# Altium schematic symbol library Centralize.SchLib: 1081 symbols (part 6 of 26)
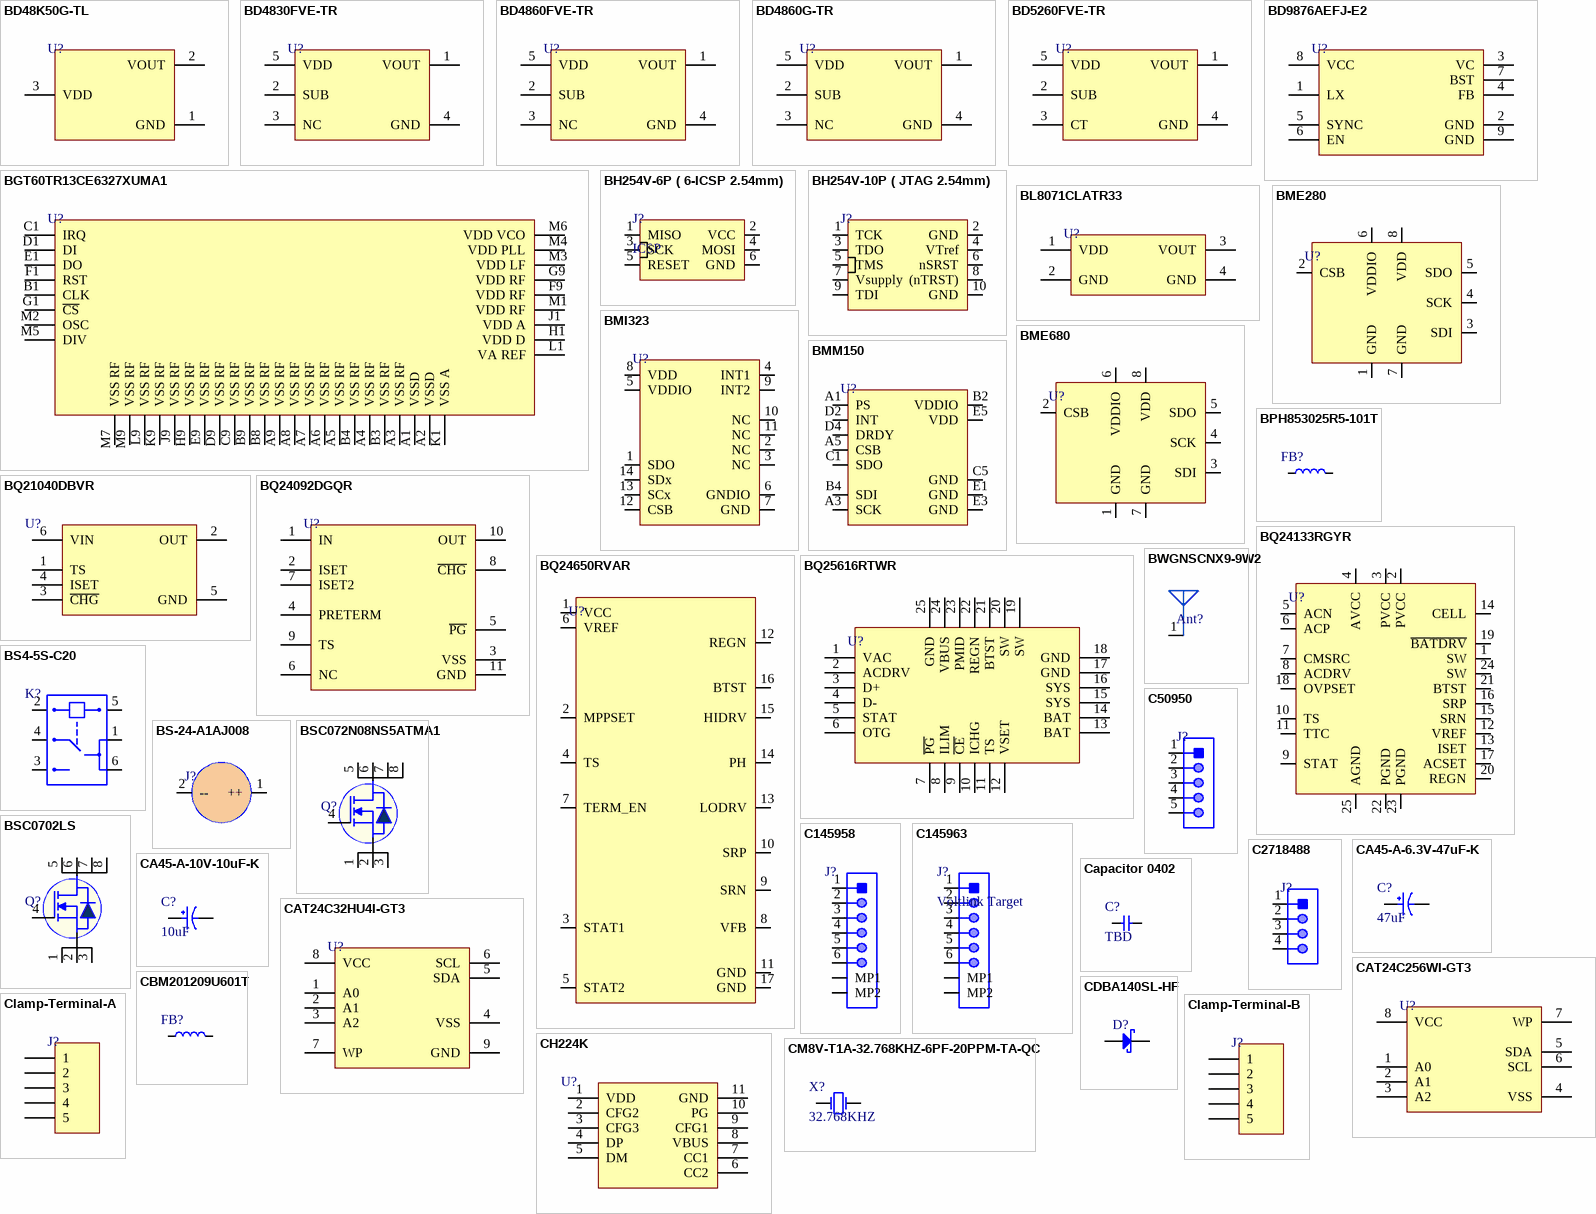
[diagram p52: symbols BD48K50G-TL to CM8V-T1A-32.768KHZ-6PF-20PPM-TA-QC]

## BSC0702LS
designator Q?
MOSFET N-CH 60V 100A SUPERSO8; Manufacturer: Infineon; Manufacturer Part Number: BSC0702LSATMA1; Item Type: Transistor; Supplier 1: Digi-Key; RoHS: No; Category: MOSFETs; Stock 1: 9380; Pricing 1: 1=1.88000, 10=1.69000, 100=1.35800, 500=1.11572, 1000=0.92978 (USD); LCSC Part Number: C501503; Supplier Part Number 1: 448-BSC0702LSATMA1CT-ND; ComponentLink1Description: LCSC; ComponentLink1URL: https://www.lcsc.com/product-detail/MOSFETs_Infineon-Technologies-BSC0702LS_C501503.html
footprint PG-TDSON-8
pins: 1 S, 2 S, 3 S, 4 G, 5 D, 6 D, 7 D, 8 D

## BWGNSCNX9-9W2
designator Ant?
Plugin,9x9mm Antennas ROHS; Manufacturer: BAT WIRELESS; Manufacturer Part Number: BWGNSCNX9-9W2; Package: Plugin,9x9mm; LCSC Part Number: C2826452; Item Type: Antenna; ComponentLink1Description: LCSC; ComponentLink1URL: https://www.lcsc.com/product-detail/Antennas_BAT-WIRELESS-BWGNSCNX9-9W2_C2826452.html
pins: 1 Feed

## C50950
designator J?
2.54mm Plugin Straight 1x5P 5 Plugin,P=2.54mm Female Headers ROHS; Manufacturer: BOOMELE; Manufacturer Part Number: C50950; Package: Plugin,P=2.54mm; LCSC Part Number: C50950; Item Type: Female Header; ComponentLink1Description: LCSC; ComponentLink1URL: https://www.lcsc.com/product-detail/Female-Headers_BOOMELE-Boom-Precision-Elec-C50950_C50950.html
footprint HDR 1x5 Female
pins: 1, 2, 3, 4, 5

## C145958
designator J?
1x6P SH 1 1mm 6 Phosphor coppe SMD,P=1mm Wire To Board / Wire To Wire Connector ROHS; Manufacturer Part Number: C145958; Manufacturer: BOOMELE; Package: SMD,P=1mm; LCSC Part Number: C145958; ComponentLink1Description: LCSC; ComponentLink1URL: https://www.lcsc.com/product-detail/Wire-To-Board-Wire-To-Wire-span-style-background-color-ff0-Connector-span_BOOMELE-Boom-Precision-Elec-C145958_C145958.html; Item Type: Connector
footprint Voltlink Horizontal
pins: 1, 2, 3, 4, 5, 6, MP1, MP2

## C145963
designator J?, comment Voltlink Target
1x6P SH 1 1mm 6 SMD,P=1mm Wire To Board / Wire To Wire Connector ROHS; Manufacturer: BOOMELE; Manufacturer Part Number: C145963; Package: SMD,P=1mm; LCSC Part Number: C145963; Item Type: Connector; ComponentLink1Description: LCSC; ComponentLink1URL: https://www.lcsc.com/product-detail/Wire-To-Board-Wire-To-Wire-Connector_BOOMELE-Boom-Precision-Elec-C145963_C145963.html
footprint Voltlink Target
pins: 1, 2, 3, 4, 5, 6, MP1, MP2

## C2718488
designator J?
2.54mm Plugin 3A bronze -40℃~+105℃ Straight 1x4P Top 4 Square Holes Plugin,P=2.54mm Female Headers ROHS; Manufacturer: BOOMELE; Manufacturer Part Number: C2718488; Item Type: Header; Package: Plugin,P=2.54mm; LCSC Part Number: C2718488; ComponentLink1Description: LCSC; ComponentLink1URL: https://www.lcsc.com/product-detail/Female-Headers_BOOMELE-Boom-Precision-Elec-C2718488_C2718488.html
footprint HDR1X4 Female
pins: 1, 2, 3, 4

## CA45-A-6.3V-47uF-K
designator C?, comment 47uF
47uF 6.3V 5Ω@100kHz ±10% CASE-A-3216 Tantalum Capacitors ROHS; Manufacturer: CEC; Manufacturer Part Number: CA45-A-6.3V-47uF-K; Package: CASE-A-3216; ComponentLink1Description: LCSC; ComponentLink1URL: https://www.lcsc.com/product-detail/Tantalum-Capacitors_CEC-Shenzhen-Zhenhua-XinYun-Elec-CA45-A-6-3V-47uF-K_C129570.html; LCSC Part Number: C129570; Item Type: Capacitor
footprint Case-A
pins: 1, 2

## CA45-A-10V-10uF-K
designator C?, comment 10uF
10uF 10V 8Ω@100kHz ±10% CASE-A-3216 Tantalum Capacitors ROHS; Manufacturer: CEC(Shenzhen Zhenhua XinYun Elec); Manufacturer Part Number: CA45-A-10V-10uF-K; Package: CASE-A-3216; LCSC Part Number: C128253; Item Type: Capacitor; ComponentLink1Description: LCSC; ComponentLink1URL: https://www.lcsc.com/product-detail/Tantalum-Capacitors_CEC-Shenzhen-Zhenhua-XinYun-Elec-CA45-A-10V-10uF-K_C128253.html
footprint Case-A
pins: 1, 2

## Capacitor 0402
designator C?, comment TBD
DO Not Mount
footprint Cap-0402
pins: 1, 2

## CAT24C32HU4I-GT3
designator U?
IC EEPROM 32KBIT I2C 1MHZ 8UDFN; Manufacturer: ON Semiconductor; Manufacturer Part Number: CAT24C32HU4I-GT3; Interface: I2C,Serial,2-Wire; Density: 32Kb; Max Supply Voltage: 5.5V; Min Supply Voltage: 1.7V; Number of Words: 4096; Access Time: 3500ns; Frequency: 100kHz; Nominal Supply Current: 2mA; Operating Supply Voltage: 5V; Organization: 4KX8; Access Time-Max: 900ns; Write Protection: YES; Supplier 1: Digi-Key; RoHS: Yes; Category: EEPROM; Stock 1: 5701; Pricing 1: 1=0.47000, 10=0.45700, 25=0.42440, 50=0.42220, 100=0.37490, 250=0.37012, 500=0.36452, 1000=0.35478 (USD); Mount: Surface Mount; Number of Pins: 8; Contact Plating: Gold; Min Operating Temperature: -40°C; Max Operating Temperature: 85°C; Packaging: Tape and Reel; Package Quantity: 3000; Memory Type: EEPROM; Memory Size: 32Kb; Max Frequency: 1MHz; Series: -; Supply Current: 2mA; Length: 3.05mm; Width: 2.05mm; Height: 0.5mm; Radiation Hardening: No; REACH SVHC: No SVHC; Lead Free: Lead Free; Halogen Free: Halogen Free; RoHS Compliant: Yes; ComponentLink1URL: https://datasheet.ciiva.com/15123/getdatasheetpartid-488928-15123672.pdf?src-supplier=Verical; ComponentLink1Description: https://datasheet.ciiva.com/15123/getdatasheetpartid-488928-15123672.pdf?src-supplier=Verical; ComponentLink2URL: https://datasheet.ciiva.com/1912/cat24c32-d-1912019.pdf?src-supplier=Digi-Key; ComponentLink2Description: https://datasheet.ciiva.com/1912/cat24c32-d-1912019.pdf?src-supplier=Digi-Key; ComponentLink3URL: https://datasheet.ciiva.com/9282/cat24c32-d-9282397.pdf?src-supplier=Avnet; ComponentLink3Description: https://datasheet.ciiva.com/9282/cat24c32-d-9282397.pdf?src-supplier=Avnet; ComponentLink4URL: https://datasheet.ciiva.com/22618/1696760-22618476.pdf?src-supplier=Element14; ComponentLink4Description: https://datasheet.ciiva.com/22618/1696760-22618476.pdf?src-supplier=Element14; Supplier Part Number 1: CAT24C32HU4I-GT3OSCT-ND; LCSC Part Number: C233772; Item Type: IC
footprint 8-UDFN-EP 2x3
pins: 1 A0, 2 A1, 3 A2, 4 VSS, 5 SDA, 6 SCL, 7 WP, 8 VCC, 9 GND

## CAT24C256WI-GT3
designator U?
IC EEPROM 256KBIT I2C 1MHZ 8SOIC; Manufacturer: ON Semiconductor; Manufacturer Part Number: CAT24C256WI-GT3; Interface: I2C,Serial,2-Wire; Access Time: 900ns; Max Supply Voltage: 5.5V; Min Supply Voltage: 1.8V; Frequency: 400kHz; Memory Size: 256Kb; Number of Words: 32000; Operating Supply Voltage: 5V; Nominal Supply Current: 3mA; Write Cycle Time-Max (tWC): 5ms; Write Protection: YES; Organization: 32KX8; Supplier 1: RSComponents; RoHS: Yes; Category: EEPROM; Stock 1: 300; Pricing 1: 100=0.19900, 200=0.19400, 500=0.18900, 1000=0.18400 (GBP); Mount: Surface Mount; Case/Package: SOIC; Number of Pins: 8; Contact Plating: Gold; Min Operating Temperature: -40°C; Max Operating Temperature: 85°C; Packaging: Tape and Reel; Density: 256Kb; Package Quantity: 1; Memory Type: EEPROM; Max Frequency: 400kHz; Series: -; Supply Voltage-Nom: 5.5V; Access Time-Max: 900ns; Supply Current: 3mA; Length: 5mm; Width: 4mm; Height: 1.5mm; Radiation Hardening: No; Lead Free: Lead Free; Halogen Free: Halogen Free; REACH SVHC: No SVHC; RoHS Compliant: Yes; ComponentLink1URL: https://datasheet.ciiva.com/8072/1780696-8072142.pdf?src-supplier=Element14; ComponentLink1Description: https://datasheet.ciiva.com/8072/1780696-8072142.pdf?src-supplier=Element14; ComponentLink2URL: https://datasheet.ciiva.com/46391/1792913-46391371.pdf?src-supplier=Element14; ComponentLink2Description: https://datasheet.ciiva.com/46391/1792913-46391371.pdf?src-supplier=Element14; ComponentLink3URL: https://datasheet.ciiva.com/4859/cat24c256-d-105771-4859816.pdf?src-supplier=Mouser; ComponentLink3Description: https://datasheet.ciiva.com/4859/cat24c256-d-105771-4859816.pdf?src-supplier=Mouser; ComponentLink4URL: https://datasheet.ciiva.com/16427/cat24c256-d-16427973.pdf?src-supplier=Future+Electronics; ComponentLink4Description: https://datasheet.ciiva.com/16427/cat24c256-d-16427973.pdf?src-supplier=Future+Electronics; Supplier Part Number 1: 8080199P; LCSC Part Number: C79987; Item Type: IC
footprint SOIC-8
pins: 1 A0, 2 A1, 3 A2, 4 VSS, 5 SDA, 6 SCL, 7 WP, 8 VCC

## CBM201209U601T
designator FB?
100mΩ ±25% 600Ω@100MHz 0805 Ferrite Beads ROHS; Manufacturer: FH; Manufacturer Part Number: CBM201209U601T; Package: 0805; LCSC Part Number: C139168; Item Type: Ferrite Bead; ComponentLink1Description: LCSC; ComponentLink1URL: https://www.lcsc.com/product-detail/Ferrite-Beads_FH-Guangdong-Fenghua-Advanced-Tech-CBM201209U601T_C139168.html
footprint Ind-0805 (Inductor 0805)
pins: 1, 2

## CDBA140SL-HF
designator D?
40V Single 1A 270mV@1A SMA(DO-214AC) Schottky Barrier Diodes (SBD) ROHS; Manufacturer: Comchip; Manufacturer Part Number: CDBA140SL-HF; Item Type: Schottky Diode; Package: SMA(DO-214AC); LCSC Part Number: C3012747; ComponentLink1Description: LCSC; ComponentLink1URL: https://www.lcsc.com/product-detail/Schottky-Barrier-Diodes-SBD_Comchip-CDBA140SL-HF_C3012747.html
pins: 1 K, 2 A

## CH224K
designator U?
ESSOP-10 USB ICs ROHS; Manufacturer: WCH(Jiangsu Qin Heng); Manufacturer Part Number: CH224K; Item Type: IC; Package: ESSOP-10; LCSC Part Number: C970725; ComponentLink1Description: LCSC; ComponentLink1URL: https://www.lcsc.com/product-detail/USB-ICs_WCH-Jiangsu-Qin-Heng-CH224K_C970725.html
footprint ESSOP-10
pins: 1 VDD, 2 CFG2, 3 CFG3, 4 DP, 5 DM, 6 CC2, 7 CC1, 8 VBUS, 9 CFG1, 10 PG, 11 GND

## Clamp-Terminal-A
designator J?
PinHeader_1x05_P5.00mm_Vertical
footprint Clamp-Terminal-A
pins: 1, 2, 3, 4, 5

## Clamp-Terminal-B
designator J?
PinHeader_1x05_P5.00mm_Vertical
footprint Clamp-Terminal-B.
pins: 1, 2, 3, 4, 5

## CM8V-T1A-32.768KHZ-6PF-20PPM-TA-QC
designator X?, comment 32.768KHZ
Crystal 32.768KHZ 6.0PF SMD; Manufacturer: Micro Crystal; Manufacturer Part Number: CM8V-T1A-32.768KHZ-6PF-20PPM-TA-QC; Supplier 1: Digi-Key; RoHS: No; Stock 1: 21000; Pricing 1: 1=0.68000, 10=0.56400, 50=0.50740, 100=0.45100, 500=0.42844 (USD); Supplier Part Number 1: 2195-CM8V-T1A-32.768KHZ-6PF-20PPM-TA-QCCT-ND
footprint 2-SMD, (2.00mm x 1.20mm)
pins: 1 OSC1, 2 OSC2

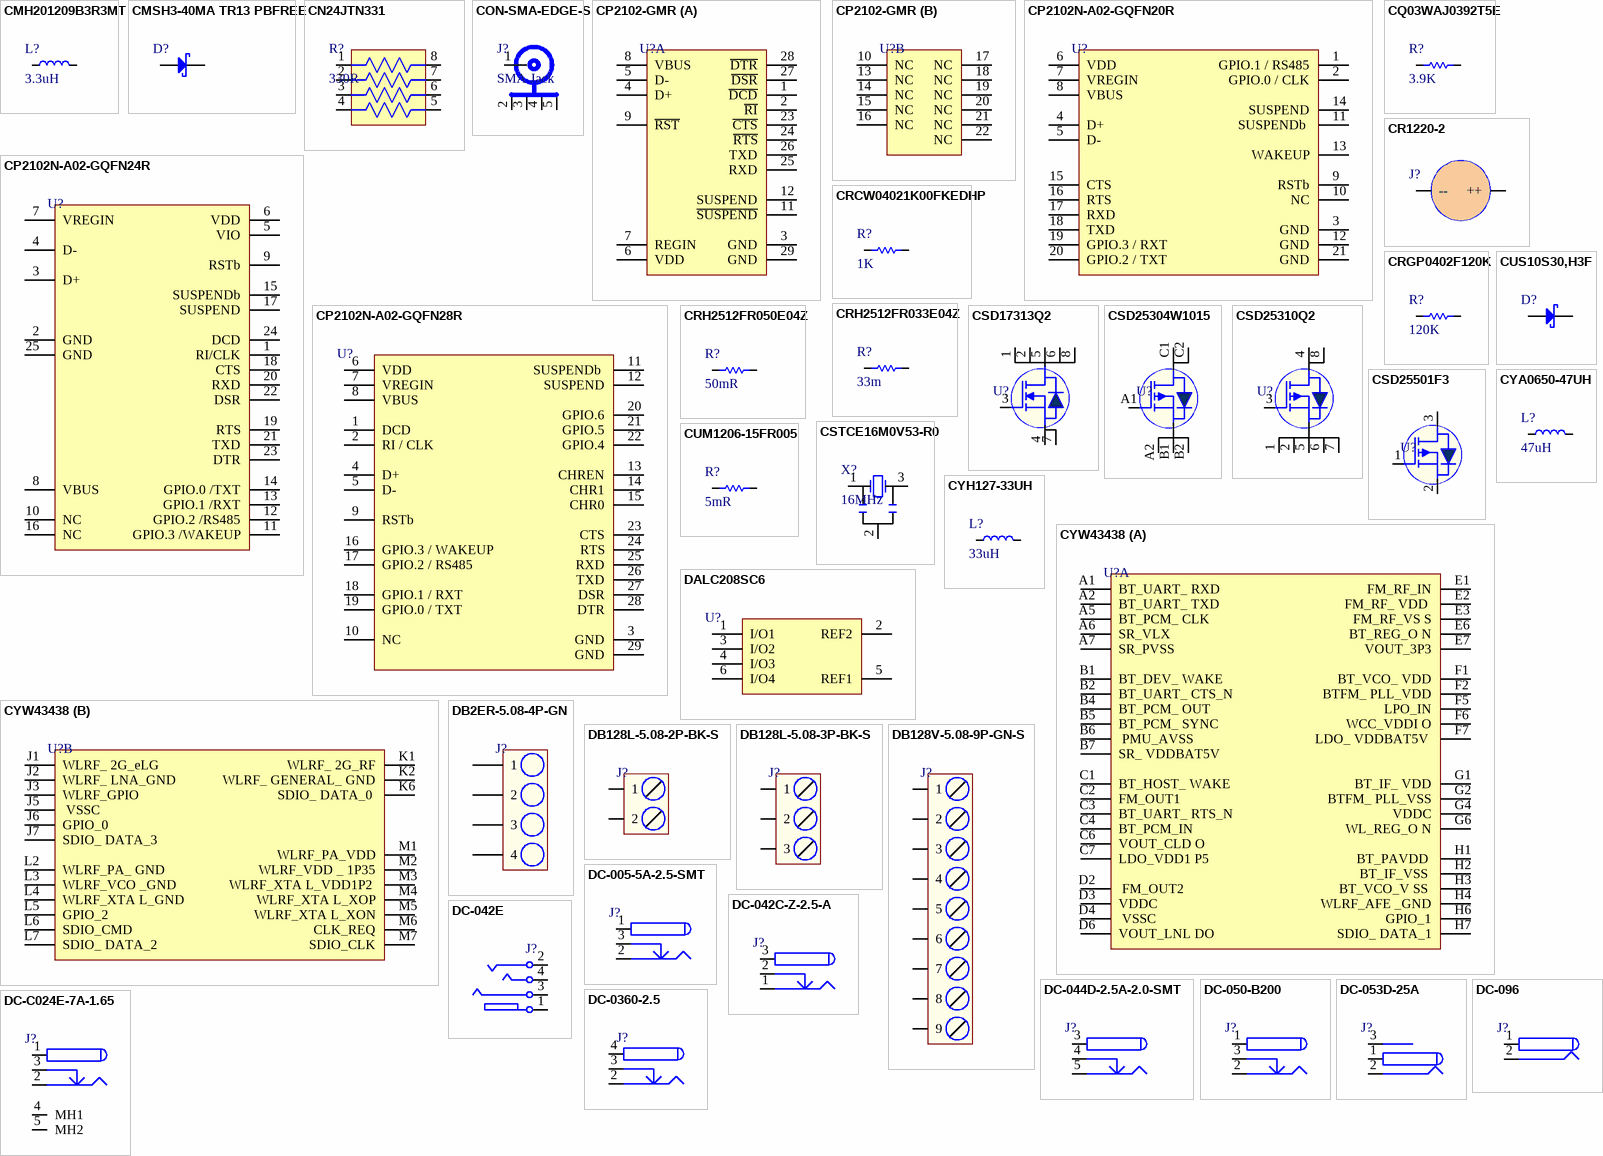
[diagram p6: symbols CMH201209B3R3MT to DC-C024E-7A-1.65]

## CMH201209B3R3MT
designator L?, comment 3.3uH
800mA 3.3uH ±20% 0805 Power Inductors ROHS; Manufacturer: FH (Guangdong Fenghua Advanced Tech); Manufacturer Part Number: CMH201209B3R3MT; Package: 0805; LCSC Part Number: C394958; Item Type: Inductor; ComponentLink1Description: LCSC; ComponentLink1URL: https://www.lcsc.com/product-detail/Power-Inductors_FH-Guangdong-Fenghua-Advanced-Tech-CMH201209B3R3MT_C394958.html
footprint Ind-0805 (Inductor 0805)
pins: 1, 2

## CMSH3-40MA TR13 PBFREE
designator D?
DIODE SCHOTTKY 40V 3A SMA; Manufacturer: Central Semiconductor; Manufacturer Part Number: CMSH3-40MA TR13 PBFREE; Supplier 1: Digi-Key; Stock 1: 27620; Pricing 1: 1=0.67, 10=0.592, 100=0.4536, 500=0.3586, 1000=0.28688, 2000=0.25999 (USD); RoHS Compliant: Yes; Supplier Part Number 1: 1514-CMSH3-40MATR13PBFREEDKR-ND
footprint SMA
pins: 1 K, 2 A

## CN24JTN331
designator R?, comment 330R
4 8 ±5% 330Ω 62.5mW ±250ppm/℃ 0402x4 Resistor Networks & Arrays ROHS; Manufacturer: TA-I Tech; Manufacturer Part Number: CN24JTN331; Item Type: Resistor Array; Package: 0402x4; LCSC Part Number: C162973; ComponentLink1Description: LCSC; ComponentLink1URL: https://www.lcsc.com/product-detail/span-style-background-color-ff0-Resistor-span-Networks-Arrays_TA-I-Tech-CN24JTN331_C162973.html
footprint Res-0402x4
pins: 1, 2, 3, 4, 5, 6, 7, 8

## CON-SMA-EDGE-S
designator J?, comment SMA Jack
Sma Female Connector, Pcb Edge Mount Rohs Compliant: Yes; Manufacturer: RF Solutions; Manufacturer Part Number: CON-SMA-EDGE-S; Number of Ports: 1; Supplier 1: Rs; RoHS: Yes; Category: RF / Coaxial Connectors; Stock 1: 4145; Pricing 1: 1=1.16, 10=0.96 (GBP); Mount: Edge,Board; Case/Package: SMA; Connector Type: SMA; Fastening Type: Threaded; Termination: Solder; Series: -; ComponentLink1URL: https://media.digikey.com/pdf/Data%20Sheets/RF%20Solutions%20PDFs/CON-SMA-EDGE.pdf?src-supplier=Digi-Key; ComponentLink1Description: https://media.digikey.com/pdf/Data%20Sheets/RF%20Solutions%20PDFs/CON-SMA-EDGE.pdf?src-supplier=Digi-Key; Package: THT; Item Type: Connector; Supplier Part Number 1: 1258191
footprint CON-SMA-EDGE_S
pins: 1 ANT, 2 GND, 3 GND, 4 GND, 5 GND

## CP2102-GMR
designator U?
IC USB-TO-UART BRIDGE 28VQFN; Manufacturer: Silicon Labs; Manufacturer Part Number: CP2102-GMR; Nominal Supply Current: 26mA; Number of Channels: 1; Data Rate: 1000Kbps; Max Supply Voltage: 3.6V; Min Supply Voltage: 3V; Interface: UART; Operating Supply Current: 20mA; Supplier 1: Arrow Electronics; RoHS: Yes; Category: Interface ICs; Stock 1: 642; Pricing 1: 1=5.84100, 10=5.78300, 25=5.72500, 100=5.66800, 250=5.61100, 500=5.55500 (USD); Mounting Technology: Surface Mount; Case/Package: QFN; Pins: 28; Weight: 0.00239oz; Contact Plating: Tin; Min Operating Temperature: -40°C; Max Operating Temperature: 85°C; Packaging: Tape and Reel; Package Quantity: 1500; Series: -; Supply Current: 26mA; Radiation Hardening: No; Lead Free: Lead Free; RoHS Compliant: Yes; ComponentLink1URL: https://datasheet.ciiva.com/6636/cp2102-9-6636566.pdf?src-supplier=Digi-Key; ComponentLink1Description: https://datasheet.ciiva.com/6636/cp2102-9-6636566.pdf?src-supplier=Digi-Key; ComponentLink2URL: https://datasheet.ciiva.com/6636/cp2102-9-6636571.pdf?src-supplier=Digi-Key; ComponentLink2Description: https://datasheet.ciiva.com/6636/cp2102-9-6636571.pdf?src-supplier=Digi-Key; Supplier Part Number 1: CP2102-GMR; LCSC Part Number: C6568; Item Type: IC
footprint 28-QFN (5x5)_
part A pins: 1 ~{DCD} "Data Carrier Detect control input (active low)", 2 ~{RI} "Ring Indicator control input (active low)", 3 GND "Ground", 4 D+ "USB D+", 5 D- "USB D-", 6 VDD "3.0-3.6 V Power Supply Voltage Input. 3.3 V Voltage Regulator Output", 7 REGIN "5 V Regulator Input. This pin is the input to the on-chip voltage regulator.", 8 VBUS "VBUS Sense Input. This pin should be connected to the VBUS signal of a USB network. A 5 V signal on this pin indicates a USB network connection.", 9 ~{RST} "Device Reset. Open-drain output of internal POR or VDD monitor. An external source can initiate a system reset by driving this pin low for at least 15 us.", 11 ~{SUSPEND}, 12 SUSPEND, 23 ~{CTS} "Clear To Send control input (active low)", 24 ~{RTS} "Ready to Send control output (active low)", 25 RXD "Asynchronous data input (UART Receive)", 26 TXD "Asynchronous data output (UART Transmit)", 27 ~{DSR} "Data Set Ready control input (active low)", 28 ~{DTR} "Data Terminal Ready control output (active low)", 29 GND "Ground"
part B pins: 10 NC "These pins should be left unconnected or tied to VDD.", 13 NC "These pins should be left unconnected or tied to VDD.", 14 NC "These pins should be left unconnected or tied to VDD.", 15 NC "These pins should be left unconnected or tied to VDD.", 16 NC "These pins should be left unconnected or tied to VDD.", 17 NC "These pins should be left unconnected or tied to VDD.", 18 NC "These pins should be left unconnected or tied to VDD.", 19 NC "These pins should be left unconnected or tied to VDD.", 20 NC "These pins should be left unconnected or tied to VDD.", 21 NC "These pins should be left unconnected or tied to VDD.", 22 NC "These pins should be left unconnected or tied to VDD."

## CP2102N-A02-GQFN20R
designator U?
IC USB TO UART BRIDGE QFN20; Manufacturer: Silicon Labs; Manufacturer Part Number: CP2102N-A02-GQFN20R; Supplier 1: Arrow Electronics; RoHS: Yes; Category: Interface ICs; Stock 1: 1500; Pricing 1: 1500=2.30100, 3000=2.28500, 6000=2.26800, 12000=2.25200, 15000=2.23600, 24000=2.22000, 30000=2.20300 (USD); Supplier Part Number 1: CP2102N-A02-GQFN20R; ComponentLink1Description: LCSC; ComponentLink1URL: https://www.lcsc.com/product-detail/USB-ICs_SILICON-LABS-CP2102N-A02-GQFN20R_C969913.html; LCSC Part Number: C969913; Item Type: IC
footprint 20-QFN (3x3)
pins: 1 GPIO.1 / RS485, 2 GPIO.0 / CLK, 3 GND, 4 D+, 5 D-, 6 VDD, 7 VREGIN , 8 VBUS, 9 RSTb, 10 NC, 11 SUSPENDb , 12 GND, 13 WAKEUP, 14 SUSPEND, 15 CTS, 16 RTS, 17 RXD, 18 TXD, 19 GPIO.3 / RXT, 20 GPIO.2 / TXT, 21 GND

## CP2102N-A02-GQFN24R
designator U?
IC USB TO UART BRIDGE QFN24; Manufacturer: Silicon Labs; Manufacturer Part Number: CP2102N-A02-GQFN24R; Supplier 1: Arrow Electronics; RoHS: Yes; Category: Interface ICs; Stock 1: 321; Pricing 1: 1=2.66900, 10=2.64300, 25=2.61700, 100=2.59000, 250=2.56400 (USD); ComponentLink1URL: https://www.silabs.com/documents/public/data-sheets/cp2102n-datasheet.pdf?src-supplier=Digi-Key; ComponentLink1Description: https://www.silabs.com/documents/public/data-sheets/cp2102n-datasheet.pdf?src-supplier=Digi-Key; Supplier Part Number 1: CP2102N-A02-GQFN24R; LCSC Part Number: C969151; Item Type: IC
footprint 24-QFN (4x4)
pins: 1 RI/CLK, 2 GND, 3 D+, 4 D-, 5 VIO, 6 VDD, 7 VREGIN, 8 VBUS, 9 RSTb, 10 NC, 11 GPIO.3 /WAKEUP, 12 GPIO.2 /RS485, 13 GPIO.1 /RXT, 14 GPIO.0 /TXT, 15 SUSPENDb, 16 NC, 17 SUSPEND, 18 CTS, 19 RTS, 20 RXD, 21 TXD, 22 DSR, 23 DTR, 24 DCD, 25 GND

## CP2102N-A02-GQFN28R
designator U?
IC USB TO UART BRIDGE QFN28; Manufacturer: Silicon Labs; Manufacturer Part Number: CP2102N-A02-GQFN28R; Supplier 1: Digi-Key; RoHS: Yes; Stock 1: 1242; Pricing 1: 1=1.47000 (USD); Supplier Part Number 1: 336-5890-1-ND; LCSC Part Number: C964632; Item Type: IC
footprint 28-QFN (5x5)_
pins: 1 DCD, 2 RI / CLK, 3 GND, 4 D+, 5 D-, 6 VDD, 7 VREGIN , 8 VBUS, 9 RSTb, 10 NC, 11 SUSPENDb , 12 SUSPEND, 13 CHREN, 14 CHR1, 15 CHR0, 16 GPIO.3 / WAKEUP, 17 GPIO.2 / RS485, 18 GPIO.1 / RXT, 19 GPIO.0 / TXT, 20 GPIO.6, 21 GPIO.5, 22 GPIO.4, 23 CTS, 24 RTS, 25 RXD, 26 TXD, 27 DSR, 28 DTR, 29 GND

## CQ03WAJ0392T5E
designator R?, comment 3.9K
100mW ±100ppm/℃ ±5% 3.9kΩ 0603 Chip Resistor - Surface Mount ROHS; Manufacturer: UNI-ROYAL; Manufacturer Part Number: CQ03WAJ0392T5E; Footprint: 0603; ComponentLink1Description: LCSC; ComponentLink1URL: https://lcsc.com/product-detail/Chip-span-style-background-color-ff0-Resistor-span-Surface-Mount_UNI-ROYAL-Uniroyal-Elec-CQ03WAJ0392T5E_C966588.html; LCSC Part Number: C966588
footprint Res-0603
pins: 1, 2

## CR1220-2
designator J?
SMD Battery Holders, Clips & Contacts RoHS; Manufacturer: Q&J; Manufacturer Part Number: CR1220-2; Package: Cuctom; LCSC Part Number: C70381; ComponentLink1Description: LCSC; ComponentLink1URL: https://www.lcsc.com/product-detail/Battery-Connectors_Q-J-CR1220-2_C70381.html
footprint CR1220-2_
pins: 1 ++, 2 --, MH1 hidden, MH2 hidden

## CRCW04021K00FKEDHP
designator R?, comment 1K
RES SMD 1K OHM 1% 1/5W 0402; Manufacturer: Vishay Dale; Manufacturer Part Number: CRCW04021K00FKEDHP; Resistance: 1kR; Temperature Coefficient: 100ppm/°C; Power Rating: 125mW; Voltage Rating: 50V; Supplier 1: Digi-Key; Stock 1: 315989; Pricing 1: 1=0.15, 10=0.132, 100=0.0506, 1000=0.02226, 2500=0.01923, 5000=0.0172 (USD); Mount: Surface Mount; Case/Package: 0402; Number of Pins: 2; Contact Plating: Tin; Weight: 2.3E-05oz; Case Code (Imperial): 0402; Case Code (Metric): 1005; Size Code: 0402; Min Operating Temperature: -55°C; Max Operating Temperature: 155°C; Tolerance: 1%; Resistor Type: Thick Film; Package Quantity: 10; Packaging: Tape and Reel; Number of Terminations: 2; Termination: SMD/SMT; Max Power Dissipation: 125mW; Voltage Rating (DC): 50V; Features: Automotive AEC-Q200; Series: CRCW-HP; Construction: Rectangular; Technology: THICK FILM; Resistance Tolerance: 1%; Length: 1mm; Width: 0.5mm; Height: 0.3mm; Depth: 0.5mm; Radiation Hardening: No; REACH SVHC: Unknown; Military Standard: Not; Lead Free: Lead Free; RoHS Compliant: Yes; ComponentLink1URL: http://www.farnell.com/datasheets/2339608.pdf?src-supplier=Element14; ComponentLink1Description: http://www.farnell.com/datasheets/2339608.pdf?src-supplier=Element14; ComponentLink2URL: http://www.vishay.com/docs/20043/crcwhpe3.pdf?src-supplier=Digi-Key; ComponentLink2Description: http://www.vishay.com/docs/20043/crcwhpe3.pdf?src-supplier=Digi-Key; ComponentLink3URL: http://www.mouser.com/ds/2/427/crcwhpe3-46056.pdf?src-supplier=Mouser; ComponentLink3Description: http://www.mouser.com/ds/2/427/crcwhpe3-46056.pdf?src-supplier=Mouser; ComponentLink4URL: http://www.vishay.com/docs/20043/crcwhpe3.pdf?src-supplier=Avnet; ComponentLink4Description: http://www.vishay.com/docs/20043/crcwhpe3.pdf?src-supplier=Avnet; ComponentLink5URL: http://www.vishay.com/docs/20043/crcwhpe3.pdf?src-supplier=Future+Electronics; ComponentLink5Description: http://www.vishay.com/docs/20043/crcwhpe3.pdf?src-supplier=Future+Electronics; Supplier Part Number 1: 541-1.00KYCT-ND; LCSC Part Number: C313354
footprint Res-0402
pins: 1, 2

## CRGP0402F120K
designator R?, comment 120K
CRGP 0402 120K 1%; Manufacturer: TE Connectivity; Manufacturer Part Number: CRGP0402F120K; Supplier 1: Digi-Key; Stock 1: 98708; Pricing 1: 1=0.1, 10=0.092, 100=0.0355, 1000=0.01563, 2500=0.0135, 5000=0.01208 (USD); RoHS Compliant: Yes; Supplier Part Number 1: A130380CT-ND; LCSC Part Number: C4133953
footprint Res-0402
pins: 1, 2

## CRH2512FR033E04Z
designator R?, comment 33m
0.033Ω  2512 Low Resistors & Current Sense Resistors - SMD; Manufacturer: Ever Ohms Tech; Manufacturer Part Number: CRH2512FR033E04Z; Tolerance: ±1%; Temperature Coefficient: ±1800ppm/°C; Footprint: 2512; Resistance (Ohms): 0.033Ω; ComponentLink1Description: LCSC; ComponentLink1URL: https://lcsc.com/product-detail/Current-Sense-Resistors-Shunt-Resistors_Ever-Ohms-Tech-CRH2512FR033E04Z_C176032.html; LCSC Part Number: C176032
footprint RES-2512
pins: 1, 2

## CRH2512FR050E04Z
designator R?, comment 50mR
2W 50mΩ ±1% 2512 Current Sense Resistors/Shunt Resistors ROHS; Manufacturer: Ever Ohms Tech; Manufacturer Part Number: CRH2512FR050E04Z; Package: 2512; LCSC Part Number: C176035; ComponentLink1Description: LCSC; ComponentLink1URL: https://www.lcsc.com/product-detail/Current-Sense-Resistors-Shunt-Resistors_Ever-Ohms-Tech-CRH2512FR050E04Z_C176035.html; Item Type: Resistor
footprint RES-2512
pins: 1, 2

## CSD17313Q2
designator U?
30V 5A 2.3W 30mΩ@4A,8V null WSON-6 MOSFETs ROHS; Manufacturer: Texas Instruments; Manufacturer Part Number: CSD17313Q2; Item Type: IC; Supplier: Mouser; Supplier Part Number: 595-CSD17313Q2; RoHS: Yes; Category: MOSFETs; Stock: 12528; Pricing: 1=0.59, 10=0.502, 50=0.502, 100=0.375, 1000=0.228, 10000=0.156 (USD); ComponentLink1URL: https://datasheet.ciiva.com/6388/csd17313q2-6388183.pdf?src-supplier=Digi-Key; ComponentLink1Description: https://datasheet.ciiva.com/6388/csd17313q2-6388183.pdf?src-supplier=Digi-Key; ComponentLink2URL: https://datasheet.ciiva.com/4438/slps260b-128048-4438543.pdf?src-supplier=Mouser; ComponentLink2Description: https://datasheet.ciiva.com/4438/slps260b-128048-4438543.pdf?src-supplier=Mouser; ComponentLink3URL: https://datasheet.ciiva.com/1255/csd17313q2-1255358.pdf?src-supplier=Newark; ComponentLink3Description: https://datasheet.ciiva.com/1255/csd17313q2-1255358.pdf?src-supplier=Newark; ComponentLink4URL: https://datasheet.ciiva.com/7968/1536237-7968249.pdf?src-supplier=Element14; ComponentLink4Description: https://datasheet.ciiva.com/7968/1536237-7968249.pdf?src-supplier=Element14; LCSC Part Number: C2863837
footprint CSD17313Q2 (6-WSON (2x2))
pins: 1 D, 2 D, 3 G, 4 S, 5 D, 6 D, 7 S, 8 D

## CSD25304W1015
designator U?
MOSFET P-CH 20V 3A 6DSBGA; Manufacturer: Texas Instruments; Manufacturer Part Number: CSD25304W1015; Item Type: IC; Supplier: Digi-Key; Supplier Part Number: 296-40005-1-ND; RoHS: Yes; Category: Integrated Circuits (ICs); Stock: 3000; Pricing: 1=0.51, 10=0.436, 100=0.3252, 500=0.25552, 1000=0.19746 (USD); ComponentLink1URL: http://www.ti.com/general/docs/suppproductinfo.tsp?distId=10&amp;gotoUrl=http%3A%2F%2Fwww.ti.com%2Flit%2Fgpn%2Fcsd25304w1015&src-supplier=Digi-Key; ComponentLink1Description: http://www.ti.com/general/docs/suppproductinfo.tsp?distId=10&amp;gotoUrl=http%3A%2F%2Fwww.ti.com%2Flit%2Fgpn%2Fcsd25304w1015&src-supplier=Digi-Key; ComponentLink2URL: http://www.ti.com/lit/ds/symlink/csd25304w1015.pdf?src-supplier=Digi-Key; ComponentLink2Description: http://www.ti.com/lit/ds/symlink/csd25304w1015.pdf?src-supplier=Digi-Key; ComponentLink3URL: http://www.ti.com/general/docs/lit/getliterature.tsp?genericPartNumber=CSD25304W1015&&fileType=pdf&src-supplier=Avnet; ComponentLink3Description: http://www.ti.com/general/docs/lit/getliterature.tsp?genericPartNumber=CSD25304W1015&&fileType=pdf&src-supplier=Avnet; ComponentLink4URL: http://www.ti.com/lit/gpn/csd25304w1015?src-supplier=Mouser; ComponentLink4Description: http://www.ti.com/lit/gpn/csd25304w1015?src-supplier=Mouser; LCSC Part Number: C2860532
footprint 6-DSBGA (1x1.5)
pins: A1 G, A2 S, B1 S, B2 S, C1 D, C2 D

## CSD25310Q2
designator U?
MOSFET P-CH 20V 48A 6SON; Manufacturer: Texas Instruments; Manufacturer Part Number: CSD25310Q2; Supplier: Mouser; Supplier Part Number: 595-CSD25310Q2; RoHS: Yes; Category: Integrated Circuits (ICs); Stock: 10899; Pricing: 1=0.51, 10=0.438, 50=0.438, 100=0.327, 1000=0.198, 10000=0.136 (USD); ComponentLink1URL: https://datasheet.ciiva.com/29747/csd25310q2-29747573.pdf?src-supplier=Digi-Key; ComponentLink1Description: https://datasheet.ciiva.com/29747/csd25310q2-29747573.pdf?src-supplier=Digi-Key; LCSC Part Number: C468254; Item Type: Mosfet
footprint CSD25310Q2
pins: 1 S, 2 S, 3 G, 4 D, 5 S, 6 S, 7 S, 8 D

## CSD25501F3
designator U?
MOSFET P-CH 20V 3.6A 3LGA; Manufacturer: Texas Instruments; Manufacturer Part Number: CSD25501F3; Element Configuration: Single; Rds On Max: 76mR; Input Capacitance: 385pF; Max Power Dissipation: 500mW; Item Type: IC; Supplier: Mouser; Supplier Part Number: 595-CSD25501F3; RoHS: Yes; Category: Integrated Circuits (ICs); Stock: 42227; Pricing: 1=0.45, 10=0.34, 50=0.34, 100=0.212, 1000=0.112, 10000=0.086 (USD); Mounting Technology: Surface Mount; Case/Package: LGA; Pins: 3; Min Operating Temperature: -55°C; Max Operating Temperature: 150°C; Packaging: Cut Tape; Drain to Source Voltage (Vdss): 20V; Continuous Drain Current (ID): 3.6A; Series: FemtoFET™; RoHS Compliant: Yes; ComponentLink1URL: http://www.ti.com/lit/ds/symlink/csd25501f3.pdf?src-supplier=Digi-Key; ComponentLink1Description: http://www.ti.com/lit/ds/symlink/csd25501f3.pdf?src-supplier=Digi-Key; ComponentLink2URL: http://www.ti.com/general/docs/suppproductinfo.tsp?distId=10&amp;gotoUrl=http%3A%2F%2Fwww.ti.com%2Flit%2Fgpn%2Fcsd25501f3&src-supplier=Digi-Key; ComponentLink2Description: http://www.ti.com/general/docs/suppproductinfo.tsp?distId=10&amp;gotoUrl=http%3A%2F%2Fwww.ti.com%2Flit%2Fgpn%2Fcsd25501f3&src-supplier=Digi-Key; LCSC Part Number: C2872196
footprint PicoStar-3
pins: 1 G, 2 S, 3 D

## CSTCE16M0V53-R0
designator X?, comment 16MHz
16MHz 15pF ±0.5%; Manufacturer: Murata; Manufacturer Part Number: CSTCE16M0V53-R0; Impedance: 40R; Frequency Stability: 0.3%; Item Type: Cystal; Supplier 1: Farnell; RoHS: Yes; Category: Capacitors; Pricing 1: 5=0.34500, 50=0.26100, 250=0.23600, 500=0.19400, 1500=0.18300, 3000=0.17100, 15000=0.16800 (GBP); Case/Package: SMD/SMT; Number of Pins: 3; Contact Plating: Gold; Weight: 0.001023oz; Min Operating Temperature: -20°C; Max Operating Temperature: 80°C; Frequency: 16MHz; Frequency Tolerance: 0.5%; Self Resonant Frequency: 16MHz; Load Capacitance: 15pF; Tolerance: 0.5%; Package Quantity: 3000; Capacitance: 15pF; Packaging: Tape and Reel; Termination: SMD/SMT; Resistor Type: Ceramic; Series: CERALOCK® CSTCE; Length: 3.2mm; Width: 1.3mm; Height: 0.9mm; Reach SVHC Compliant: Yes; Lead Free: Lead Free; RoHS Compliant: Yes; ComponentLink1URL: https://datasheet.ciiva.com/18183/getdatasheetpartid-152969-18183272.pdf?src-supplier=Verical; ComponentLink1Description: https://datasheet.ciiva.com/18183/getdatasheetpartid-152969-18183272.pdf?src-supplier=Verical; ComponentLink2URL: https://datasheet.ciiva.com/1361/1506176-1361293.pdf?src-supplier=Element14; ComponentLink2Description: https://datasheet.ciiva.com/1361/1506176-1361293.pdf?src-supplier=Element14; ComponentLink3URL: https://datasheet.ciiva.com/14132/ceralock-eng-bro-14132735.pdf?src-supplier=Distrelec; ComponentLink3Description: https://datasheet.ciiva.com/14132/ceralock-eng-bro-14132735.pdf?src-supplier=Distrelec; ComponentLink4URL: https://datasheet.ciiva.com/884/p16e-884478.pdf?src-supplier=Digi-Key; ComponentLink4Description: https://datasheet.ciiva.com/884/p16e-884478.pdf?src-supplier=Digi-Key; ComponentLink5URL: https://datasheet.ciiva.com/884/p16e-884477.pdf?src-supplier=Digi-Key; ComponentLink5Description: https://datasheet.ciiva.com/884/p16e-884477.pdf?src-supplier=Digi-Key; ComponentLink6URL: https://datasheet.ciiva.com/884/p16e-884479.pdf?src-supplier=Digi-Key; ComponentLink6Description: https://datasheet.ciiva.com/884/p16e-884479.pdf?src-supplier=Digi-Key; ComponentLink7URL: https://datasheet.ciiva.com/16216/l0430e-16216847.pdf?src-supplier=Future+Electronics; ComponentLink7Description: https://datasheet.ciiva.com/16216/l0430e-16216847.pdf?src-supplier=Future+Electronics; Supplier Part Number 1: 2443265; LCSC Part Number: C32180
footprint SMD3213-3P
pins: 1 CRYSTAL, 2, 3 CRYSTAL

## CUM1206-15FR005
designator R?, comment 5mR
1W 5mΩ ±1% 1206 Current Sense Resistors/Shunt Resistors ROHS; Manufacturer: FORT; Manufacturer Part Number: CUM1206-15FR005; Item Type: Capacitor; Package: 1206; LCSC Part Number: C5185588; ComponentLink1Description: LCSC; ComponentLink1URL: https://www.lcsc.com/product-detail/Current-Sense-Resistors-Shunt-Resistors_FORT-CUM1206-15FR005_C5185588.html
footprint Res-1206
pins: 1, 2

## CUS10S30,H3F
designator D?
Diode Schottky 30V 1A Surface Mount USC; Manufacturer: Toshiba; Manufacturer Part Number: CUS10S30,H3F; Max Reverse Current: 500uA; Peak Non-Repetitive Surge Current: 5A; Element Configuration: Single; Supplier 1: Avnet; RoHS: Yes; Category: Rectifier Diodes; Stock 1: 9000; Pricing 1: 3000=0.04896, 6000=0.04768, 12000=0.04544, 18000=0.04416, 24000=0.04320, 30000=0.04192, 300000=0.04096 (USD); Mount: Surface Mount; Case/Package: SOD; Number of Pins: 2; Contact Plating: Tin,Silver; Min Operating Temperature: -55°C; Max Operating Temperature: 125°C; Packaging: Cut Tape; Average Rectified Current: 1A; Max Reverse Voltage (DC): 30V; RoHS Compliant: No; ComponentLink1URL: https://toshiba.semicon-storage.com/info/docget.jsp?did=14077&prodName=CUS10S30&src-supplier=Digi-Key; ComponentLink1Description: https://toshiba.semicon-storage.com/info/docget.jsp?did=14077&prodName=CUS10S30&src-supplier=Digi-Key; ComponentLink2URL: http://toshiba.semicon-storage.com/info/docget.jsp?did=14077&prodName=CUS10S30&src-supplier=Avnet; ComponentLink2Description: http://toshiba.semicon-storage.com/info/docget.jsp?did=14077&prodName=CUS10S30&src-supplier=Avnet; ComponentLink3URL: http://toshiba.semicon-storage.com/info/lookup.jsp?pid=CUS10S30&amp;lang=en&src-supplier=Mouser; ComponentLink3Description: http://toshiba.semicon-storage.com/info/lookup.jsp?pid=CUS10S30&amp;lang=en&src-supplier=Mouser; Supplier Part Number 1: CUS10S30,H3F; LCSC Part Number: C146335
footprint SOD-323
pins: 1 K, 2 A

## CYA0650-47UH
designator L?, comment 47uH
2A 47uH ±20% 250mΩ SMD,6.6x7.2mm Inductors (SMD) ROHS; Manufacturer: SHOU HAN; Manufacturer Part Number: CYA0650-47UH; Package: SMD,6.6x7.2mm; LCSC Part Number: C5189938; Item Type: Inductor; ComponentLink1Description: LCSC; ComponentLink1URL: https://www.lcsc.com/product-detail/Inductors-SMD_SHOU-HAN-CYA0650-47UH_C5189938.html
footprint CYA0650-47UH
pins: 1, 2

## CYH127-33UH
designator L?, comment 33uH
3A 33uH ±20% 64.8mΩ SMD,12.3x12.3mm Inductors (SMD) ROHS; Manufacturer: SHOU HAN; Manufacturer Part Number: CYH127-33UH; Package: SMD,12.3x12.3mm; LCSC Part Number: C2929502; Item Type: Inductor; ComponentLink1Description: LCSC; ComponentLink1URL: https://www.lcsc.com/product-detail/Inductors-SMD_SHOU-HAN-CYH127-33UH_C2929502.html
footprint CYH127-33UH
pins: 1, 2

## CYW43438
designator U?
IEEE 802.11ac b/g/n and Bluetooth v4.1 and FM Receiver; Manufacturer: Cypress; Manufacturer Part Number: CYW43438KUBGT; Item Type: IC; Supplier 1: Digi-Key; RoHS: No; Category: RF Receivers, Transceivers; Pricing 1: 5000=3.75000 (USD); RoHS Compliant: No; Supplier Part Number 1: BCM43438KUBGT-ND; LCSC Part Number: C2951523; ComponentLink1Description: LCSC; ComponentLink1URL: https://lcsc.com/product-detail/RF-Transceiver-ICs_Cypress-Semicon-CYW43438KUBGT_C2951523.html
footprint 63-WLBGA (2.87x4.87)
part A pins: A1 BT_UART_ RXD, A2 BT_UART_ TXD, A5 BT_PCM_ CLK , A6 SR_VLX, A7 SR_PVSS, B1 BT_DEV_ WAKE , B2 BT_UART_ CTS_N, B4 BT_PCM_ OUT, B5 BT_PCM_ SYNC, B6  PMU_AVSS , B7 SR_ VDDBAT5V, C1 BT_HOST_ WAKE , C2 FM_OUT1 , C3 BT_UART_ RTS_N, C4 BT_PCM_IN, C6 VOUT_CLD O, C7 LDO_VDD1 P5, D2  FM_OUT2, D3 VDDC , D4  VSSC, D6 VOUT_LNL DO , E1 FM_RF_IN, E2 FM_RF_ VDD , E3 FM_RF_VS S, E6 BT_REG_O N, E7 VOUT_3P3, F1 BT_VCO_ VDD, F2 BTFM_ PLL_VDD, F5 LPO_IN, F6 WCC_VDDI O, F7 LDO_ VDDBAT5V , G1 BT_IF_ VDD, G2 BTFM_ PLL_VSS, G4 VDDC, G6 WL_REG_O N, H1 BT_PAVDD , H2 BT_IF_VSS , H3 BT_VCO_V SS , H4 WLRF_AFE _GND, H6 GPIO_1, H7 SDIO_ DATA_1
part B pins: J1 WLRF_ 2G_eLG, J2 WLRF_ LNA_GND , J3 WLRF_GPIO, J5  VSSC, J6 GPIO_0, J7 SDIO_ DATA_3, K1 WLRF_ 2G_RF, K2 WLRF_ GENERAL_ GND, K6 SDIO_ DATA_0 , L2 WLRF_PA_ GND , L3 WLRF_VCO _GND , L4 WLRF_XTA L_GND , L5 GPIO_2, L6 SDIO_CMD, L7 SDIO_ DATA_2, M1 WLRF_PA_VDD, M2 WLRF_VDD _ 1P35, M3 WLRF_XTA L_VDD1P2 , M4 WLRF_XTA L_XOP, M5 WLRF_XTA L_XON, M6 CLK_REQ, M7 SDIO_CLK

## DALC208SC6
designator U?
TVS DIODE 5V SOT23-6; Manufacturer Part Number: DALC208SC6; Manufacturer: STMicroelectronics; Footprint: SOT-23-6; LCSC Part Number: C5123934; ComponentLink1Description: LCSC; ComponentLink1URL: https://www.lcsc.com/product-detail/MOSFETs_TECH-PUBLIC-DALC208SC6_C5123934.html
footprint SOT-23-6
pins: 1 I/O1, 2 REF2, 3 I/O2, 4 I/O3, 5 REF1, 6 I/O4

## DB2ER-5.08-4P-GN
designator J?
450V 17.5A 4 Bend -40℃~+105℃ 1 5.08mm Green Board Edge/Receptacle-Open Push-Pull,P=5.08mm Pluggable System Terminal Block ROHS; Manufacturer: DIBO; Manufacturer Part Number: DB2ER-5.08-4P-GN; Package: Push-Pull,P=5.08mm; LCSC Part Number: C395752; Item Type: Terminal Block; ComponentLink1Description: LCSC; ComponentLink1URL: https://www.lcsc.com/product-detail/Pluggable-System-span-style-background-color-ff0-Terminal-span-Block_DIBO-DB2ER-5-08-4P-GN_C395752.html
footprint DB2ER-5.08-4P-GN
pins: 1, 2, 3, 4

## DB128L-5.08-2P-BK-S
designator J?
1x2P 18A -40℃~+105℃ 250V Black 12~30 Straight pin 5.08mm 2.5 1 2 Plugin,P=5.08mm Screw terminal ROHS; Manufacturer: DIBO; Manufacturer Part Number: DB128L-5.08-2P-BK-S; Item Type: Terminal Block; Package: Plugin,P=5.08mm; LCSC Part Number: C430601; ComponentLink1Description: LCSC; ComponentLink1URL: https://www.lcsc.com/product-detail/Screw-terminal_span-style-background-color-ff0-DIBO-span-DB128L-5-08-2P-BK-S_C430601.html
footprint DB128L-5.08-2P-BK-S
pins: 1, 2

## DB128L-5.08-3P-BK-S
designator J?
1x3P 18A -40℃~+105℃ 250V Black 12~30 Straight pin 5.08mm 2.5 1 3 Plugin,P=5.08mm Screw terminal ROHS; Manufacturer: DIBO; Manufacturer Part Number: DB128L-5.08-3P-BK-S; Item Type: Terminal Block; Package: Plugin,P=5.08mm; LCSC Part Number: C430602; ComponentLink1Description: LCSC; ComponentLink1URL: https://www.lcsc.com/product-detail/Screw-terminal_DIBO-DB128L-5-08-3P-BK-S_C430602.html
footprint DB128L-5.08-3P-BK-S
pins: 1, 2, 3

## DB128V-5.08-9P-GN-S
designator J?
1x9P 20A -40℃~+105℃ 300V Green 12~30 Straight pin 5.08mm 2.5 1 9 Plugin,P=5.08mm Screw terminal ROHS; Manufacturer: DIBO; Manufacturer Part Number: DB128V-5.08-9P-GN-S; Item Type: Terminal Block; Package: Plugin,P=5.08mm; LCSC Part Number: C2938972; ComponentLink1Description: LCSC; ComponentLink1URL: https://www.lcsc.com/product-detail/Screw-terminal_DIBO-DB128V-5-08-9P-GN-S_C2938972.html
footprint DB128V-5.08-9P-GN-S
pins: 1, 2, 3, 4, 5, 6, 7, 8, 9

## DC-005-5A-2.5-SMT
designator J?
DC Power Receptacle Jack 2.5A 2.5mm 6.5mm SMD Power Connectors RoHS; Manufacturer: XKB Enterprise; Manufacturer Part Number: DC-005-5A-2.5-SMT; Value: Custom; Package: Custom; ComponentLink1Description: LCSC; ComponentLink1URL: https://www.lcsc.com/product-detail/AC-DC-Power-Connectors_XKB-Connectivity-DC-005-5A-2-5-SMT_C319133.html; LCSC Part Number: C319133
footprint DC-005-5A-2.5-SMT
pins: 1 (power), 2 (power), 3 (power)

## DC-042C-Z-2.5-A
designator J?
Shrouded DC Power Receptacle 260℃ Brass -20℃~+70℃ 2.5mm 6mm 10A 20V Plugin AC/DC Power Connectors ROHS; Manufacturer: XKB INDUSTRIAL PRECISION LIMITED; Manufacturer Part Number: DC-042C-Z-2.5-A; ComponentLink1Description: LCSC; ComponentLink1URL: https://www.lcsc.com/product-detail/AC-span-style-background-color-ff0-DC-span-Power-Connectors_XKB-Connectivity-DC-042C-Z-2-5-A_C706901.html; LCSC Part Number: C706901; Item Type: Connector
footprint DC-042C-Z-2.5-A
pins: 1 (power), 2 (power), 3 (power)

## DC-042E
designator J?
DC Power Receptacle 260℃ Brass -20℃~+70℃ 2mm 7.5mm 10A 36V Plugin AC/DC Power Connectors ROHS; Manufacturer: XKB Connectivity; Manufacturer Part Number: DC-042E; Package: Plugin; LCSC Part Number: C397340; Item Type: Connector; ComponentLink1Description: LCSC; ComponentLink1URL: https://www.lcsc.com/product-detail/AC-span-style-background-color-ff0-DC-span-Power-Connectors_XKB-Connectivity-DC-042E_C397340.html
footprint DC-042E
pins: 1 "Sleeve (Ground)", 2, 3 "Tip/Left Channel/(+)", 4 "Tip/Left Channel/(+)"

## DC-044D-2.5A-2.0-SMT
designator J?
Panel Mounting DC Power Receptacle 260℃ Brass -20℃~+70℃ 2mm 6mm 2.5A 24V SMD AC/DC Power Connectors ROHS; Manufacturer: XKB Connectivity; Manufacturer Part Number: DC-044D-2.5A-2.0-SMT; Item Type: DC Power Jack; Package: SMD; LCSC Part Number: C397342; ComponentLink1Description: LCSC; ComponentLink1URL: https://www.lcsc.com/product-detail/AC-DC-Power-Connectors_XKB-Connectivity-DC-044D-2-5A-2-0-SMT_C397342.html
footprint DC-044D-2.5A-2.0-SMT
pins: 3 (power), 4 (power), 5 (power)

## DC-050-B200
designator J?
Surface Mount DC Power Receptacle -20℃~+70℃ 2mm 6.4mm 2A 30V SMD AC/DC Power Connectors ROHS; Manufacturer: XUNPU; Manufacturer Part Number: DC-050-B200; Item Type: DC Jack; Package: Custom; LCSC Part Number: C720582; ComponentLink1Description: LCSC; ComponentLink1URL: https://www.lcsc.com/product-detail/AC-DC-Power-Connectors_XUNPU-DC-050-B200_C720582.html
footprint DC-050-B200
pins: 1 (power), 2 (power), 3 (power)

## DC-053D-25A
designator J?
Shrouded DC Power Receptacle -20℃~+70℃ 2.5mm 6.5mm 10A 16V Plugin AC/DC Power Connectors ROHS; Manufacturer: Korean Hroparts Elec; Manufacturer Part Number: DC-053D-25A; Item Type: DC JACK; Package: Custom; LCSC Part Number: C2686352; ComponentLink1Description: LCSC; ComponentLink1URL: https://www.lcsc.com/product-detail/AC-DC-Power-Connectors_Korean-Hroparts-Elec-DC-053D-25A_C2686352.html
footprint DC-053D-25A
pins: 1 (power), 2 (power), 3 (power)

## DC-096
designator J?
DC Power Jack Socket Female Panel Mount Connector; Manufacturer: CW Switch Elec. Store; Manufacturer Part Number: DC-096; Item Type: DC Jack Female
footprint DC-096
pins: 1 (power), 2 (power)

## DC-0360-2.5
designator J?
DC Power Receptacle 260℃ Brass -20℃~+70℃ 2.5mm 6mm 2.5A 24V Plugin AC/DC Power Connectors ROHS; Manufacturer: XKB Connectivity; Manufacturer Part Number: DC-0360-2.5; Item Type: DC Jack; Package: Plugin; LCSC Part Number: C319122; ComponentLink1Description: LCSC; ComponentLink1URL: https://www.lcsc.com/product-detail/AC-DC-Power-Connectors_XKB-Connectivity-DC-0360-2-5_C319122.html
pins: 2 (power), 3 (power), 4 (power)

## DC-C024E-7A-1.65
designator J?
DC Power Receptacle 1.65mm 4.3mm 7A 24V Plugin AC/DC Power Connectors ROHS; Maunfacturer Part Number: DC-C024E-7A-1.65; Manufacturer: XKB Connectivity; Footprint: Custom; ComponentLink1Description: LCSC; ComponentLink1URL: https://lcsc.com/product-detail/AC-span-style-background-color-ff0-DC-span-Power-Connectors_XKB-Connectivity-DC-C024E-7A-1-65_C397335.html; LCSC Part Number: C397335
footprint DC-C024E-7A-1.65_
pins: 1 (power), 2 (power), 3 (power), 4 MH1 (power), 5 MH2 (power)

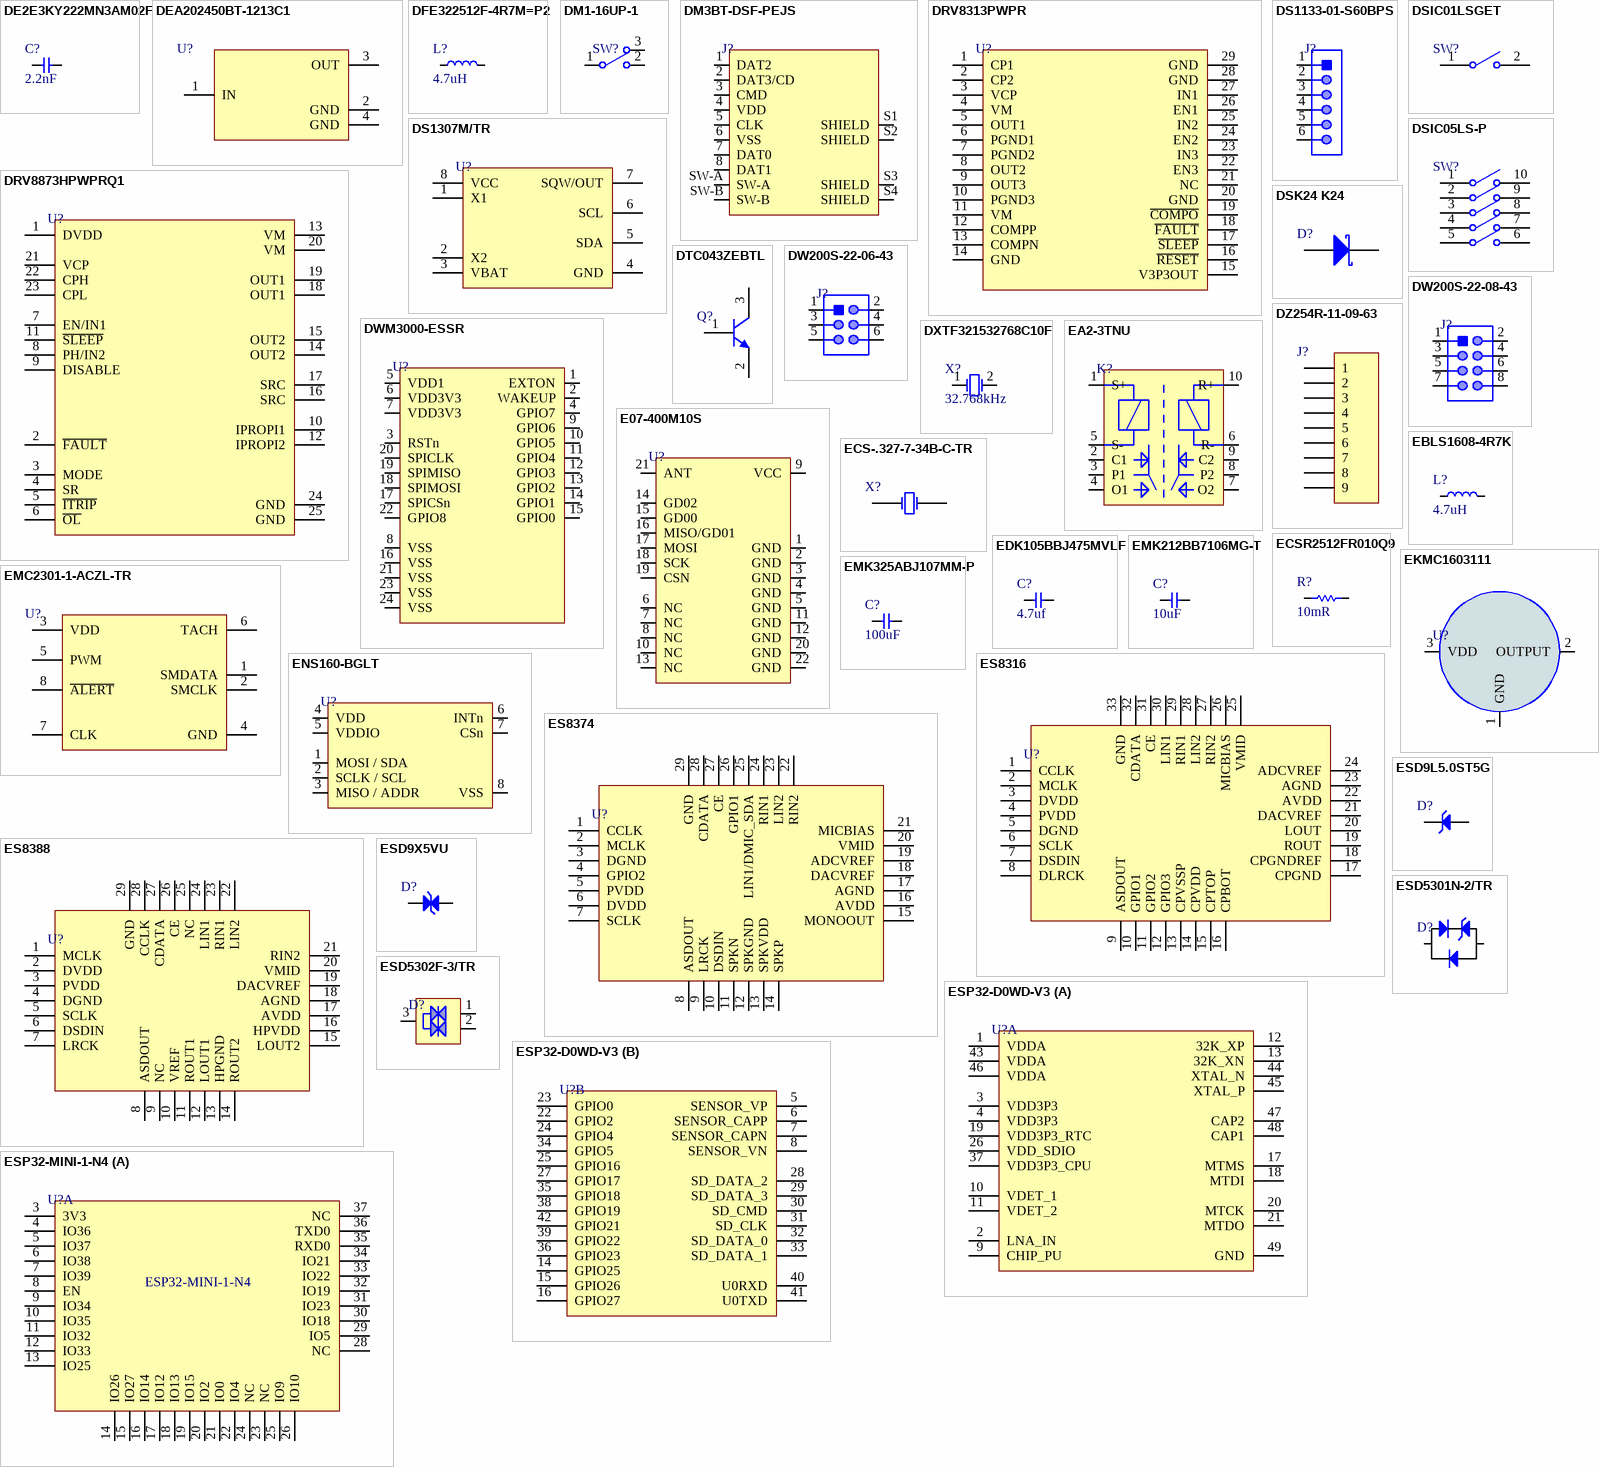
[diagram p7: symbols DE2E3KY222MN3AM02F to ESP32-MINI-1-N4]

## DE2E3KY222MN3AM02F
designator C?, comment 2.2nF
Cap Ceramic 0.0022uF 250Vac E 20% (8 X 5mm) Radial 7.5mm 125°C Ammo Pack; Manufacturer: Murata; Manufacturer Part Number: DE2E3KY222MN3AM02F; Item Type: Suppression Capacitor; Supplier: Arrow Electronics; Supplier Part Number: DE2E3KY222MN3AM02F; RoHS: Yes; Category: Ceramic Capacitors; Stock: 539100; Pricing: 900=4.7232 (USD); ComponentLink1URL: https://datasheet.ciiva.com/29537/c85e-29537334.pdf?src-supplier=Digi-Key; ComponentLink1Description: https://datasheet.ciiva.com/29537/c85e-29537334.pdf?src-supplier=Digi-Key; ComponentLink2URL: https://datasheet.ciiva.com/41797/l0015e-41797477.pdf?src-supplier=Digi-Key; ComponentLink2Description: https://datasheet.ciiva.com/41797/l0015e-41797477.pdf?src-supplier=Digi-Key; LCSC Part Number: C96464
footprint DE2E3KY222MN3AM02F
pins: 1, 2

## DEA202450BT-1213C1
designator U?
RF FILTER BAND PASS 2.45GHZ 0805; Manufacturer: TDK; Manufacturer Part Number: DEA202450BT-1213C1; Bandwidth: 100MHz; Insertion Loss: 1.5dB; Supplier 1: Arrow Electronics; RoHS: Yes; Category: EMI / RFI Components; Stock 1: 1990; Pricing 1: 1=0.16560, 10=0.15700, 25=0.15540, 100=0.15290, 250=0.15140, 500=0.14140, 1000=0.12970 (USD); Mount: Surface Mount; Case/Package: 0805; Case Code (Metric): 2012; Case Code (Imperial): 0805; Min Operating Temperature: -40°C; Max Operating Temperature: 85°C; Packaging: Tape and Reel; Package Quantity: 1; Frequency: 2.45GHz; Termination: SMD/SMT; Series: DEA; Length: 0.079inch; Width: 0.049inch; Height: 0.041inch; Radiation Hardening: No; RoHS Compliant: Yes; Lead Free: Lead Free; ComponentLink1URL: https://datasheet.ciiva.com/1023/rf-bpf-dea202450bt-1213c1-en-1023613.pdf?src-supplier=Digi-Key; ComponentLink1Description: https://datasheet.ciiva.com/1023/rf-bpf-dea202450bt-1213c1-en-1023613.pdf?src-supplier=Digi-Key; ComponentLink2URL: https://datasheet.ciiva.com/1023/rf-bpf-dea202450bt-1213c1-en-1023612.pdf?src-supplier=Digi-Key; ComponentLink2Description: https://datasheet.ciiva.com/1023/rf-bpf-dea202450bt-1213c1-en-1023612.pdf?src-supplier=Digi-Key; ComponentLink3URL: https://datasheet.ciiva.com/1023/rf-bpf-dea202450bt-1213c1-en-1023614.pdf?src-supplier=Digi-Key; ComponentLink3Description: https://datasheet.ciiva.com/1023/rf-bpf-dea202450bt-1213c1-en-1023614.pdf?src-supplier=Digi-Key; Supplier Part Number 1: DEA202450BT-1213C1; LCSC Part Number: C307898
footprint 0805 (2012 Metric), 4 PC Pad
pins: 1 IN, 2 GND, 3 OUT, 4 GND

## DFE322512F-4R7M=P2
designator L?, comment 4.7uH
FIXED IND 4.7UH 1.6A 157MOHM SMD; Manufacturer: Murata; Manufacturer Part Number: DFE322512F-4R7M=P2; Item Type: Inductor; Supplier 1: Digi-Key; RoHS: Yes; Category: Fixed Inductors; Stock 1: 4687; Pricing 1: 1=0.61, 10=0.533, 25=0.4952, 50=0.4188, 100=0.3808, 250=0.35792, 500=0.31984, 1000=0.25892 (USD); RoHS Compliant: Yes; Supplier Part Number 1: 490-DFE322512F-4R7M=P2CT-ND; LCSC Part Number: C703083
footprint IND-1210
pins: 1, 2

## DM1-16UP-1
designator SW?
1A 30V SPDT Micro Switch 1000000 times Plugin Microswitches ROHS; Manufacturer: XKB Connectivity; Manufacturer Part Number: DM1-16UP-1; Package: Plugin; LCSC Part Number: C405950; Item Type: Switch; ComponentLink1Description: LCSC; ComponentLink1URL: https://www.lcsc.com/product-detail/Microswitches_XKB-Connectivity-DM1-16UP-1_C405950.html
footprint DM1-16UP-1
pins: 1 COM, 2 NO, 3 NC

## DM3BT-DSF-PEJS
designator J?
CONN MICRO SD CARD PUSH-PUSH R/A; Manufacturer: Hirose; Manufacturer Part Number: DM3BT-DSF-PEJS; Max Current Rating: 500mA; Contact Resistance: 100mR; Voltage Rating (AC): 125V; Gender: Female; Number of Contacts: 8; Connector Type: Connector,Socket; Insulation Resistance: 1GR; Pitch: 1.1mm; Item Type: SD Card Connector; Supplier 1: Future Electronics; RoHS: Yes; Category: Memory Connectors; Stock 1: 9600; Pricing 1: 1200=1.39000 (USD); Mount: Surface Mount,Reverse; Contact Material: Copper Alloy,Copper; Contact Plating: Gold; Housing Material: Polymer; Min Operating Temperature: -25°C; Max Operating Temperature: 85°C; Number of Rows: 1; Packaging: Tape and Reel; Current Rating: 500mA; Package Quantity: 1; Termination: Solder; Max Voltage Rating (AC): 125V; Number of Positions: 8; Orientation: Right Angle; Series: DM3; Length: 13.85mm; Width: 16.05mm; Depth: 1.83mm; Radiation Hardening: No; Reach SVHC Compliant: Yes; Lead Free: Lead Free; Flammability Rating: UL94 V-0; RoHS Compliant: Yes; ComponentLink1URL: https://datasheet.ciiva.com/683/doc-1806131255093-683387.pdf?src-supplier=Digi-Key; ComponentLink1Description: https://datasheet.ciiva.com/683/doc-1806131255093-683387.pdf?src-supplier=Digi-Key; Supplier Part Number 1: 3000978; LCSC Part Number: C597972
footprint DM3BT-DSF-PEJS
pins: 1 DAT2, 2 DAT3/CD, 3 CMD, 4 VDD, 5 CLK, 6 VSS, 7 DAT0, 8 DAT1, S1 SHIELD, S2 SHIELD, S3 SHIELD, S4 SHIELD, SW-A, SW-B

## DRV8313PWPR
designator U?
Motor Driver Power MOSFET Parallel 28-HTSSOP; Manufacturer: Texas Instruments; Manufacturer Part Number: DRV8313PWPR; Number of Outputs: 1; Output Current: 1.75A; Min Supply Voltage: 8V; Max Supply Voltage: 60V; Logic Function: AND GATE; Supplier 1: Digi-Key; RoHS: Yes; Category: Motor Drivers; Stock 1: 1980; Pricing 1: 1=4.14000, 10=3.71900, 25=3.51560, 100=3.04680, 250=2.89052, 500=2.59366, 1000=2.35840 (USD); Mount: Surface Mount; Case/Package: HTSSOP; Number of Pins: 28; Min Operating Temperature: -40°C; Max Operating Temperature: 125°C; Packaging: Tape and Reel; Package Quantity: 2000; Series: -; Interface: Parallel; Lead Free: Lead Free; RoHS Compliant: Yes; ComponentLink1URL: https://datasheet.ciiva.com/24105/slvsba5a-261520-24105611.pdf?src-supplier=Mouser; ComponentLink1Description: https://datasheet.ciiva.com/24105/slvsba5a-261520-24105611.pdf?src-supplier=Mouser; ComponentLink2URL: https://datasheet.ciiva.com/6607/drv8313-6607795.pdf?src-supplier=Digi-Key; ComponentLink2Description: https://datasheet.ciiva.com/6607/drv8313-6607795.pdf?src-supplier=Digi-Key; LCSC Part  Number: C92482; Supplier Part Number 1: 296-40072-1-ND
footprint 28-HTSSOP_
pins: 1 CP1, 2 CP2, 3 VCP, 4 VM, 5 OUT1, 6 PGND1, 7 PGND2, 8 OUT2, 9 OUT3, 10 PGND3, 11 VM, 12 COMPP, 13 COMPN, 14 GND, 15 V3P3OUT, 16 ~{RESET}, 17 ~{SLEEP}, 18 ~{FAULT}, 19 ~{COMPO}, 20 GND, 21 NC, 22 EN3, 23 IN3, 24 EN2, 25 IN2, 26 EN1, 27 IN1, 28 GND, 29 GND

## DRV8873HPWPRQ1
designator U?
IC MTRDRV UNIPLR 0-5.5V 24HTSSOP; Manufacturer: Texas Instruments; Manufacturer Part Number: DRV8873HPWPRQ1; Logic Function: AND GATE; Interface: SPI; Output Current: 10mA; ComponentLink1URL: https://www.ti.com/lit/ds/symlink/drv8873-q1.pdf?src-supplier=Digi-Key; ComponentLink1Description: https://www.ti.com/lit/ds/symlink/drv8873-q1.pdf?src-supplier=Digi-Key; ComponentLink2URL: http://www.ti.com/general/docs/suppproductinfo.tsp?distId=10&amp;gotoUrl=http%3A%2F%2Fwww.ti.com%2Flit%2Fgpn%2Fdrv8873-q1&src-supplier=Digi-Key; ComponentLink2Description: http://www.ti.com/general/docs/suppproductinfo.tsp?distId=10&amp;gotoUrl=http%3A%2F%2Fwww.ti.com%2Flit%2Fgpn%2Fdrv8873-q1&src-supplier=Digi-Key; LCSC Part Number: C2150479; Item Type: IC; Supplier 1: Digi-Key; RoHS: Yes; Category: Motor Drivers; Pricing 1: 1=7.02000, 5=6.19800, 10=5.47500, 25=4.44200, 50=3.92540, 100=3.82210, 500=3.20230, 1000=3.09900 (USD); Mounting Technology: Surface Mount; Min Operating Temperature: -40°C; Max Operating Temperature: 125°C; Packaging: Cut Tape; RoHS Compliant: Yes; Supplier Part Number 1: 296-50274-1-ND
footprint HTSSOP-24-EP
pins: 1 DVDD, 2 ~{FAULT}, 3 MODE, 4 SR, 5 ~{ITRIP}, 6 ~{OL}, 7 EN/IN1, 8 PH/IN2, 9 DISABLE, 10 IPROPI1, 11 ~{SLEEP}, 12 IPROPI2, 13 VM, 14 OUT2, 15 OUT2, 16 SRC, 17 SRC, 18 OUT1, 19 OUT1, 20 VM, 21 VCP, 22 CPH, 23 CPL, 24 GND, 25 GND

## DS1133-01-S60BPS
designator J?
RJ11 RJReceptacle No 1 Plugin Ethernet Connectors/Modular Connectors (RJ45 RJ11) ROHS; Manufacturer: CONNFLY Elec; Manufacturer Part Number: DS1133-01-S60BPS; Item Type: RJ11 Ethernet Connector; Package: Custom; LCSC Part Number: C77854; ComponentLink1Description: LCSC; ComponentLink1URL: https://www.lcsc.com/product-detail/Ethernet-Connectors-Modular-Connectors-RJ45-RJ11_CONNFLY-Elec-DS1133-01-S60BPS_C77854.html
footprint DS1133-01-S60BPS
pins: 1, 2, 3, 4, 5, 6

## DS1307M/TR
designator U?
SOP-8 Real-time Clocks (RTC) ROHS; Manufacturer: HGSEMI; Manufacturer Part Number: DS1307M/TR; Item Type: IC; Package: SOP-8; LCSC Part Number: C356706; ComponentLink1Description: LCSC; ComponentLink1URL: https://www.lcsc.com/product-detail/Real-time-Clocks-RTC_HGSEMI-DS1307M-TR_C356706.html
footprint SOP-8
pins: 1 X1, 2 X2, 3 VBAT, 4 GND, 5 SDA, 6 SCL, 7 SQW/OUT, 8 VCC

## DSIC01LSGET
designator SW?
SPST Black Flat dial, raised type 2.54mm 1 SMD,2.5x6mm DIP Switches ROHS; Manufacturer: DongGuan; Manufacturer Part Number: DSIC01LSGET; Item Type: Switch; Package: SMD,2.5x6mm; LCSC Part Number: C54948; ComponentLink1Description: LCSC; ComponentLink1URL: https://www.lcsc.com/product-detail/DIP-Switches_DongGuan-KINGTEK-Industrial-Co-LTD-DSIC01LSGET_C54948.html
footprint DSIC01LSGET
pins: 1, 2

## DSIC05LS-P
designator SW?
Gull Wing SPST 24V 25mA Black -20℃~+70℃ 3000 Flat dial, raised type 2.54mm 5 SMD-10P,6x12.6mm DIP Switches ROHS; Manufacturer: XKB Connectivity; Manufacturer Part Number: DSIC05LS-P; Item Type: Switch; LCSC Part Number: C319036; ComponentLink1Description: LCSC; ComponentLink1URL: https://www.lcsc.com/product-detail/DIP-Switches_XKB-Connectivity-DSIC05LS-P_C319036.html
footprint DSIC05LS-P_
pins: 1, 2, 3, 4, 5, 6, 7, 8, 9, 10

## DSK24 K24
designator D?
40V 550mV@2A 2A SOD-123FL Schottky Barrier Diodes (SBD) ROHS; Manufacturer: MDD; Manufacturer Part Number: DSK24 K24; Item Type: Diode; Package: SOD-123FL; LCSC Part Number: C64890; ComponentLink1Description: LCSC; ComponentLink1URL: https://www.lcsc.com/product-detail/Schottky-Barrier-Diodes-SBD_MDD-Microdiode-Electronics-DSK24-K24_C64890.html
footprint SOD-123FL
pins: 1 K, 2 A